# Altium schematic symbol library SN74AHC1G04DBVRE4.SchLib: 1 symbol
Pins are listed as number, name and electrical type; pins without a type are passive.

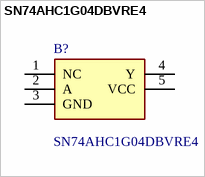
[diagram p0: symbol SN74AHC1G04DBVRE4]

## SN74AHC1G04DBVRE4
designator B?
Inverter 1-Element CMOS 5-Pin SOT-23 T/R; Manufacturer_Name: Texas Instruments; Geometry.Height: 1.45mm; Mouser Part Number: 595-SN74AHC1G04DBVRE; Mouser Price/Stock: https://www.mouser.co.uk/ProductDetail/Texas-Instruments/SN74AHC1G04DBVRE4?qs=PVVDbbWpW3K%252BS%2Feykj44gw%3D%3D; Manufacturer_Part_Number: SN74AHC1G04DBVRE4; Datasheet Link: http://www.ti.com/general/docs/suppproductinfo.tsp?distId=26&gotoUrl=http%3A%2F%2Fwww.ti.com%2Flit%2Fgpn%2Fsn74ahc1g04
footprint SOT95P280X145-5N
pins: 1 NC, 2 A, 3 GND, 4 Y, 5 VCC